# Altium schematic symbol library 2019-09-14_06-02-46.SchLib: 2 symbols
Pins are listed as number, name and electrical type; pins without a type are passive.

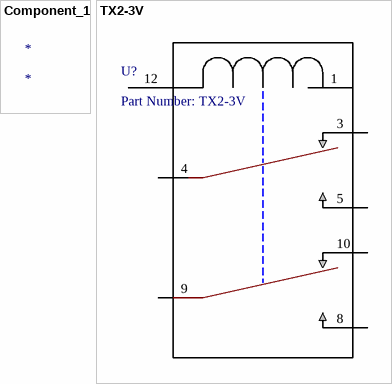
[diagram p0: symbols Component_1 to TX2-3V]

## Component_1
designator *

## TX2-3V
designator U?, comment Part Number: TX2-3V
No Description Available; Vendor: Panasonic; Built_By: EMA_UL_Team; Manufacturer_Part_Number: TX2-3V; Copyright: Copyright (C) 2018 Accelerated Designs. All rights reserved; RefDes: RefDes; Type: DEV; Value: Value
footprint RELAY_TX2
pins: 1 2, 3 5, 4 3, 5 4, 8 3, 9 6, 10 8, 12 1